# Altium footprint library WSL2512R0100FEA.PcbLib: 3 footprints
Each footprint in its own frame and in the unit in brackets; x right, y up, seen from the top. Pads: shape width x height; smd on the part's side, far side on the other; paste and mask are expansions set on the pad; w line width, h text height; cw(c..) or ccw(c..) is an arc to the next point about the centre after c.
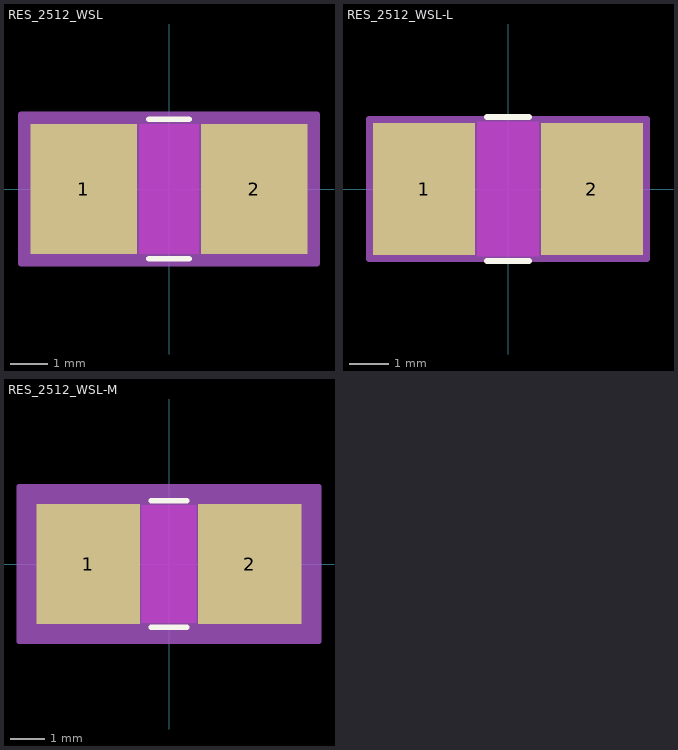
[diagram p0: the footprints below, top view; thin cyan lines are the x and y axes]

## RES_2512_WSL [mil]
pads (2):
  rect 110.78x135 smd paste+0 mask+0: 1(-88.39,0) 2(88.39,0)
Top Layer keep-out:
  region: -31,-65.5 -31,65.5 31,65.5 31,-65.5
Top Overlay:
  lines w6: -20.89,-72.5 20.89,-72.5 ; -20.89,72.5 20.89,72.5
  text ".Designator" at -137.5,-25 h50
Keep-Out Layer:
  region: -31,-67.5 -31,67.5 31,67.5 31,-67.5
Mechanical 13:
  lines w1: -130,-67.5 -130,67.5 ; -130,-67.5 -33,-67.5 -33,67.5 -130,67.5 ; -130,-67.5 130,-67.5 ; -130,-67.5 -130,67.5 ; -130,67.5 130,67.5 ; 130,-67.5 33,-67.5 33,67.5 130,67.5 ; 130,-67.5 130,67.5 ; 130,-67.5 130,67.5
  text ".Designator" at -137.5,-25 h50
Mechanical 15:
  region: 153.78,-77.5 -153.78,-77.5 -153.78,77.5 153.78,77.5
  lines w6: -153.78,-77.5 -153.78,77.5 153.78,77.5 153.78,-77.5 -153.78,-77.5
3D body "RES_2512_WSL.step": height 35, standoff 0, extent -130,-67.48 130,67.48

## RES_2512_WSL-L [mil]
pads (2):
  rect 102.91x133.03 smd paste+0 mask+0: 1(-84.45,0) 2(84.45,0)
Top Layer keep-out:
  region: -31,-65.5 -31,65.5 31,65.5 31,-65.5
Top Overlay:
  lines w6: -21.35,-72.5 21.35,-72.5 ; -21.35,72.5 21.35,72.5
  text ".Designator" at -137.5,-25 h50
Keep-Out Layer:
  region: -31,-67.5 -31,67.5 31,67.5 31,-67.5
Mechanical 13:
  lines w1: -130,-67.5 -130,67.5 ; -130,-67.5 -33,-67.5 -33,67.5 -130,67.5 ; -130,-67.5 130,-67.5 ; -130,-67.5 -130,67.5 ; -130,67.5 130,67.5 ; 130,-67.5 33,-67.5 33,67.5 130,67.5 ; 130,-67.5 130,67.5 ; 130,-67.5 130,67.5
  text ".Designator" at -137.5,-25 h50
Mechanical 15:
  region: 139.91,-70.52 -139.91,-70.52 -139.91,70.52 139.91,70.52
  lines w6: -139.91,-70.52 -139.91,70.52 139.91,70.52 139.91,-70.52 -139.91,-70.52
3D body "RES_2512_WSL.step": height 35, standoff 0, extent -130,-67.48 130,67.48

## RES_2512_WSL-M [mil]
pads (2):
  rect 118.65x136.97 smd paste+0 mask+0: 1(-92.33,0) 2(92.33,0)
Top Layer keep-out:
  region: -31,-65.5 -31,65.5 31,65.5 31,-65.5
Top Overlay:
  lines w6: -20.53,-72.5 20.53,-72.5 ; -20.53,72.5 20.53,72.5
  text ".Designator" at -137.5,-25 h50
Keep-Out Layer:
  region: -31,-67.5 -31,67.5 31,67.5 31,-67.5
Mechanical 13:
  lines w1: -130,-67.5 -130,67.5 ; -130,-67.5 -33,-67.5 -33,67.5 -130,67.5 ; -130,-67.5 130,-67.5 ; -130,-67.5 -130,67.5 ; -130,67.5 130,67.5 ; 130,-67.5 33,-67.5 33,67.5 130,67.5 ; 130,-67.5 130,67.5 ; 130,-67.5 130,67.5
  text ".Designator" at -137.5,-25 h50
Mechanical 15:
  region: 171.65,-88.48 -171.65,-88.48 -171.65,88.48 171.65,88.48
  lines w6: -171.65,-88.48 -171.65,88.48 171.65,88.48 171.65,-88.48 -171.65,-88.48
3D body "RES_2512_WSL.step": height 35, standoff 0, extent -130,-67.48 130,67.48